# Altium schematic symbol library LTST-C170TBKT.SchLib: 1 symbol
Pins are listed as number, name and electrical type; pins without a type are passive.

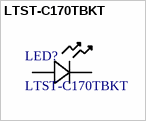
[diagram p0: symbol LTST-C170TBKT]

## LTST-C170TBKT
designator LED?
No Description Available; Manufacturer_Name: Diodes Inc; Copyright: Copyright (C) 2026 Ultra Librarian. All rights reserved.; Manufacturer_Part_Number: LTST-C170TBKT
footprint LED_LTST-C170_DIO
pins: 1 KATHODE, 2 ANODE